# Altium footprint library Footprint.PcbLib: 411 footprints (part 5 of 26)
Each footprint in its own frame and in the unit in brackets; x right, y up, seen from the top. Pads: shape width x height; smd on the part's side, far side on the other; paste and mask are expansions set on the pad; w line width, h text height; cw(c..) or ccw(c..) is an arc to the next point about the centre after c.
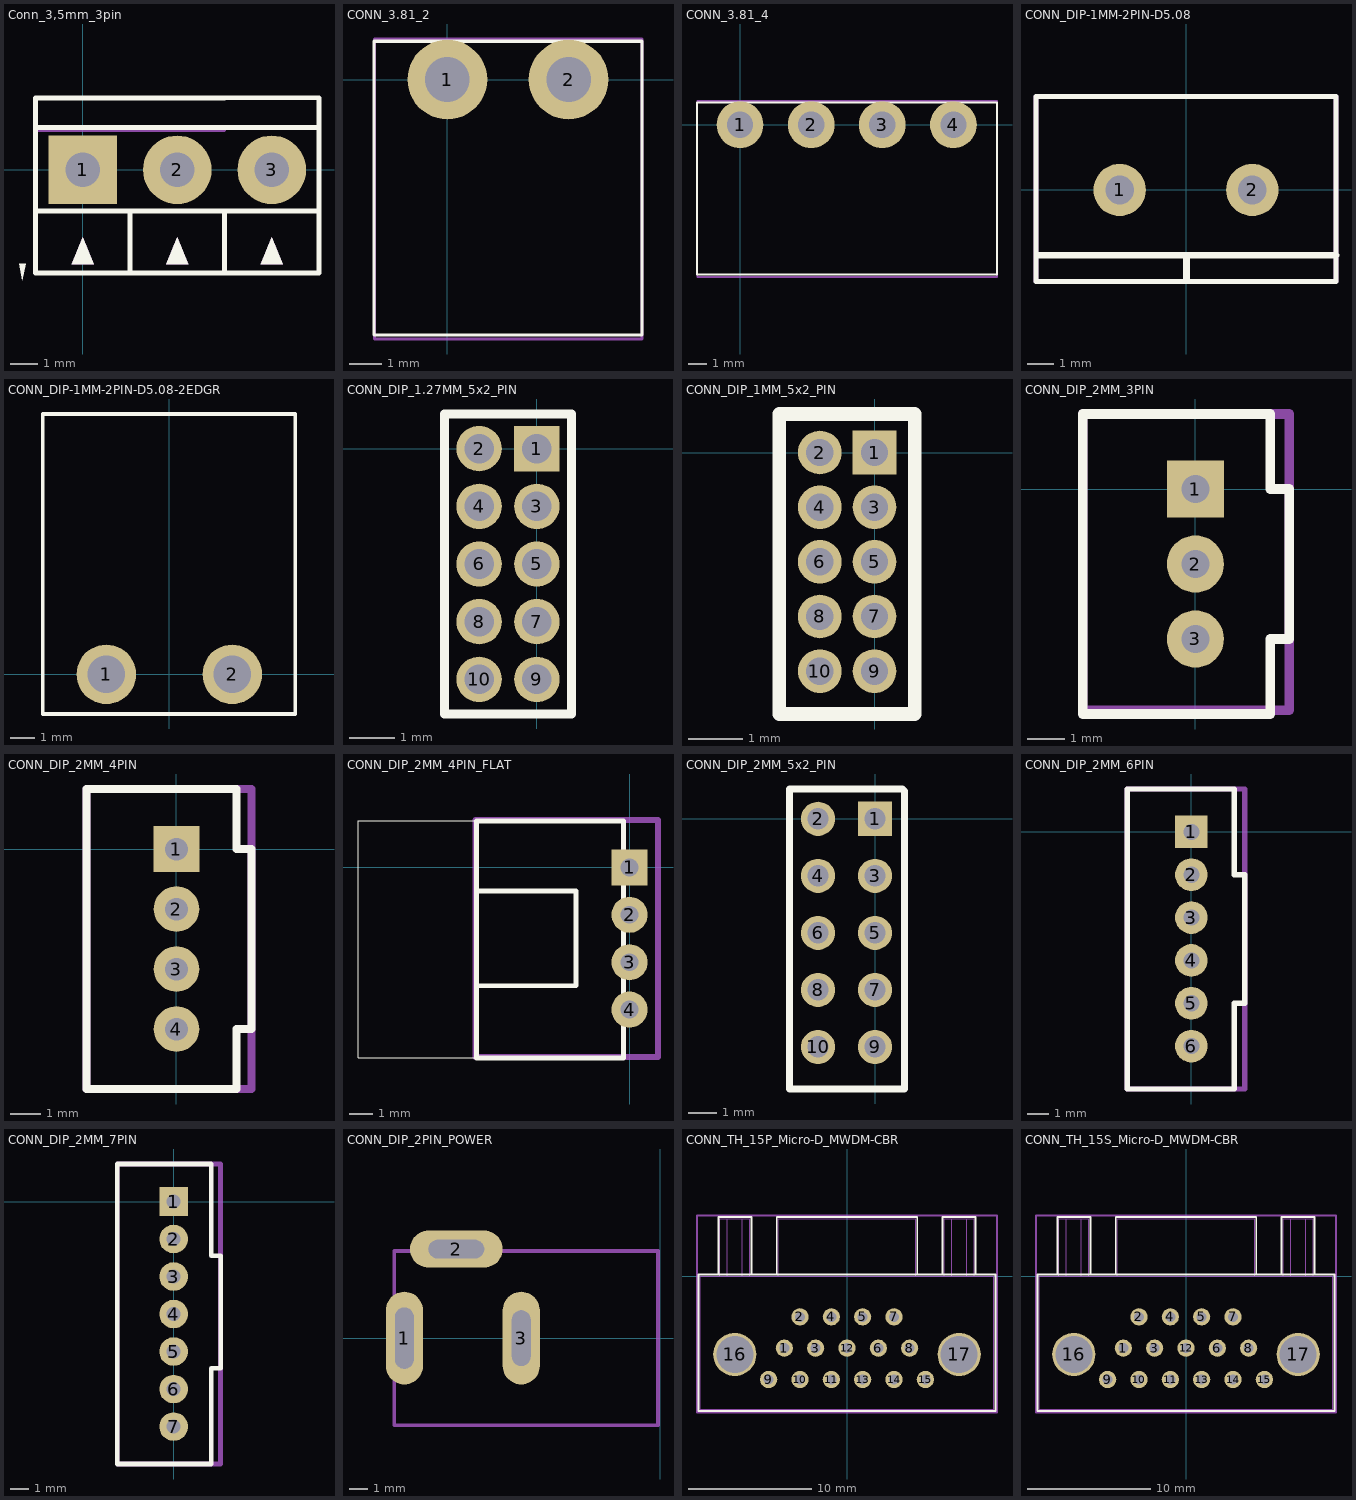
[diagram p4: the footprints below, top view; thin cyan lines are the x and y axes]

## Conn_3,5mm_3pin [mm]
pads (3):
  rect 2.54x2.54 hole 1.27: 1(0,0)
  round 2.54 hole 1.27: 2(3.5,0) 3(7,0)
Top Overlay:
  region: 7.4,-3.5 6.6,-3.5 7,-2.5
  region: 0.4,-3.5 -0.4,-3.5 0,-2.5
  region: 3.9,-3.5 3.1,-3.5 3.5,-2.5
  region: -2.235,-4.089 -2.108,-3.48 -2.362,-3.48
  lines w0.178: -1.752,1.572 1.748,1.572 8.748,1.572 8.748,2.672 1.748,2.672 -1.752,2.672 -1.752,1.472 -1.752,-1.528 ; 1.75,-3.815 1.75,-1.528 ; 1.75,-3.81 8.75,-3.81 ; 5.25,-3.815 5.25,-1.528 ; 5.25,-3.81 -1.75,-3.81 -1.75,2.667 5.25,2.667 ; 8.748,-3.828 5.248,-3.828 1.748,-3.828 -1.752,-3.828 -1.752,-1.528 ; 8.748,-1.528 5.248,-1.528 1.748,-1.528 -1.752,-1.528 ; 8.75,-3.815 8.75,-1.528 8.75,1.572
Assembly Bottom:
  region: 7.4,-3.5 6.6,-3.5 7,-2.5
  region: 0.4,-3.5 -0.4,-3.5 0,-2.5
  region: 3.9,-3.5 3.1,-3.5 3.5,-2.5
  lines w0.127: 1.75,-3.815 1.75,-1.528 ; 1.75,-3.81 8.75,-3.81 ; 5.248,1.472 1.748,1.472 -1.752,1.472 ; 5.248,2.672 1.748,2.672 -1.752,2.672 -1.752,1.472 ; 5.25,-3.815 5.25,-1.528 ; 5.25,-3.81 -1.75,-3.81 -1.75,2.667 5.25,2.667 ; 8.748,-3.828 5.248,-3.828 1.748,-3.828 -1.752,-3.828 -1.752,-1.528 ; 8.748,-1.528 5.248,-1.528 1.748,-1.528 -1.752,-1.528 ; 8.75,-3.815 8.75,-1.528 ; -1.752,-1.528 -1.752,1.472
  text ".Designator" at 0,3.1 h1.02

## CONN_3.81_2 [mm]
pads (2):
  round 2.5 hole 1.4: 1(0,0) 2(3.8,0)
Top Overlay:
  lines w0.1: -2.3,-8 6.1,-8 6.1,1.2 -2.3,1.2 -2.3,-8
Mechanical 15:
  lines w0.1: -2.286,-8.128 6.096,-8.128 6.096,1.27 -2.286,1.27 -2.286,-8.128
  text ".Designator" at -1.8,1.7 h1.52
3D body "User Library-ECH381R-02P.stp": height 7.2, standoff -3.4, extent -2.314,-7.902 6.096,1.298

## CONN_3.81_4 [mm]
pads (4):
  round 2.5 hole 1.4: 1(0,0) 2(3.8,0) 3(7.6,0) 4(11.4,0)
Top Overlay:
  lines w0.1: -2.3,-8 -2.3,1.2 13.73,1.2 13.73,-8 -2.3,-8
Mechanical 15:
  lines w0.1: -2.286,-8.128 -2.286,1.27 13.73,1.27 13.73,-8.128 -2.286,-8.128
  text ".Designator" at -1.8,1.7 h1.52
3D body "User Library-ECH381R-04P.stp": height 7.2, standoff -3.4, extent -2.295,-8.001 13.725,1.199

## CONN_DIP-1MM-2PIN-D5.08 [mm]
pads (2):
  round 2 hole 1.1: 1(-2.54,0) 2(2.54,0)
Top Overlay:
  lines w0.2: -5.74,-3.5 5.74,-3.5 5.74,3.575 -5.74,3.575 -5.74,-3.5
  lines w0.254: -5.7,-2.5 5.74,-2.5 ; 0.02,-3.4 0.02,-2.5
  text ".Designator" at -3.415,2.086 h1.52
Mechanical 15:
  lines w0.2: -5.74,-3.5 -5.74,3.575 5.74,3.575 5.74,-3.5 -5.74,-3.5
  text ".Designator" at -3.415,2.086 h1.52
3D body "38261.stp": height 15.1, standoff -3.4, extent -5.665,-4.8 5.065,4.7

## CONN_DIP-1MM-2PIN-D5.08-2EDGR [mm]
pads (2):
  round 2.4 hole 1.5: 1(-2.54,0) 2(2.54,0)
Top Overlay:
  lines w0.15: -5.1,-1.6 5.075,-1.6 5.075,10.5 -5.1,10.5 -5.1,-1.6
  text ".Designator" at -3.415,2.086 h1.52
Mechanical 15:
  text ".Designator" at -3.415,2.086 h1.52
3D body "User Library-2EDGR-5_08-02P.step": height 8.3, standoff -3.9, extent -5.09,-1.6 5.07,10.5

## CONN_DIP_1.27MM_5x2_PIN [mm]
pads (10):
  rect 1x1 hole 0.65: 1(0,0)
  round 1 hole 0.65: 2(-1.27,0) 3(0,-1.27) 4(-1.27,-1.27) 5(0,-2.54) 6(-1.27,-2.54) 7(0,-3.81) 8(-1.27,-3.81) 9(0,-5.08) 10(-1.27,-5.08)
Top Overlay:
  lines w0.2: -2.032,-5.842 -2.032,0.762 0.762,0.762 0.762,-5.842 -2.032,-5.842
Mechanical 15:
  text ".Designator" at -2.7,2.4 h1.52

## CONN_DIP_1MM_5x2_PIN [mm]
pads (10):
  rect 0.8x0.8 hole 0.5: 1(0,0)
  round 0.8 hole 0.5: 2(-1,0) 3(0,-1) 4(-1,-1) 5(0,-2) 6(-1,-2) 7(0,-3) 8(-1,-3) 9(0,-4) 10(-1,-4)
Top Overlay:
  lines w0.254: -1.744,-4.784 0.737,-4.784 0.737,0.705 -1.744,0.705 -1.744,-4.784
Mechanical 15:
  text ".Designator" at -2.7,2.4 h1.52

## CONN_DIP_2MM_3PIN [mil]
pads (3):
  rect 60x60 hole 29.53: 1(0,0)
  round 60 hole 29.53: 2(0,-78.74) 3(0,-157.48)
Top Overlay:
  lines w10: -118.11,-236.22 78.74,-236.22 78.74,-157.48 98.43,-157.48 98.43,0 78.74,0 78.74,78.74 -118.11,78.74 -118.11,-236.22
Mechanical 15:
  circle w10: c0,0 r11.81
  lines w10: -118.11,-232.28 98.43,-232.28 98.43,78.74 -118.11,78.74 -118.11,-232.28
  text ".Designator" at -118.11,94.49 h60

## CONN_DIP_2MM_4PIN [mil]
pads (4):
  rect 60x60 hole 29.53: 1(0,0)
  round 60 hole 29.53: 2(0,-78.74) 3(0,-157.48) 4(0,-236.22)
Top Overlay:
  lines w10: -118.11,-314.96 78.74,-314.96 78.74,-236.22 98.43,-236.22 98.43,0 78.74,0 78.74,78.74 -118.11,78.74 -118.11,-314.96
Mechanical 15:
  circle w10: c0,0 r8.8
  lines w10: -118.11,-314.96 -118.11,78.74 98.43,78.74 98.43,-314.96 -118.11,-314.96
  text ".Designator" at -98.43,98.43 h60

## CONN_DIP_2MM_4PIN_FLAT [mil]
pads (4):
  rect 60x60 hole 29.53: 1(0,0)
  round 60 hole 29.53: 2(0,-78.74) 3(0,-157.48) 4(0,-236.22)
Top Overlay:
  lines w1.97: -254.33,-316.54 -451.18,-316.54 -451.18,77.17 -254.33,77.17
  lines w7.87: -254.33,-196.46 -88.98,-196.46 -88.98,-38.98 -254.33,-38.98 ; -254.33,-316.54 -254.33,77.17 -10.24,77.17 -10.24,-316.54 -254.33,-316.54
Mechanical 15:
  circle w10: c0,0 r14.2
  lines w10: -255.91,-314.96 -255.91,78.74 47.24,78.74 47.24,-314.96 -255.91,-314.96
  text ".Designator" at -244.09,98.43 h60

## CONN_DIP_2MM_5x2_PIN [mm]
pads (10):
  rect 1.2x1.2 hole 0.75: 1(0,0)
  round 1.2 hole 0.75: 2(-2,0) 3(0,-2) 4(-2,-2) 5(0,-4) 6(-2,-4) 7(0,-6) 8(-2,-6) 9(0,-8) 10(-2,-8)
Top Overlay:
  lines w0.254: -3,-9.475 1.034,-9.475 1.034,-8 1.034,0.969 0.957,1.046 -3,1.046 -3,-9.475
Mechanical 15:
  text ".Designator" at -2.7,2.4 h1.52

## CONN_DIP_2MM_6PIN [mil]
pads (6):
  rect 60x60 hole 29.53: 1(0,0)
  round 60 hole 29.53: 2(0,-78.74) 3(0,-157.48) 4(0,-236.22) 5(0,-314.96) 6(0,-393.7)
Top Overlay:
  lines w10: -118.11,-472.44 78.74,-472.44 78.74,-314.96 98.43,-314.96 98.43,-78.74 78.74,-78.74 78.74,78.74 -118.11,78.74 -118.11,-472.44
Mechanical 15:
  circle w10: c0,0 r20.07
  lines w10: -118.11,-472.44 -118.11,78.74 98.43,78.74 98.43,-472.44 -118.11,-472.44
  text ".Designator" at -106.3,94.49 h60

## CONN_DIP_2MM_7PIN [mil]
pads (7):
  rect 60x60 hole 29.53: 1(0,0)
  round 60 hole 29.53: 2(0,-78.74) 3(0,-157.48) 4(0,-236.22) 5(0,-314.96) 6(0,-393.7) 7(0,-472.44)
Top Overlay:
  lines w10: 78.74,-350.22 78.74,-551 -118.11,-551 -118.11,78.74 78.74,78.74 78.74,-114 ; 79,-350.22 98.69,-350.22 98.69,-114 79,-114
Mechanical 15:
  circle w10: c0,0 r20.07
  lines w10: -118.11,-551 98.43,-551 98.43,78.74 -118.11,78.74 -118.11,-551
  text ".Designator" at -106.3,94.49 h60

## CONN_DIP_2PIN_POWER [mm]
pads (3):
  oval 2x5 hole 1 slot 3.3 at 90 deg: 1(-13.8,0)
  oval 5x2 hole 1 slot 3 at 0 deg: 2(-11,4.8)
  oval 2x5 hole 1 slot 3 at 90 deg: 3(-7.5,0)
Mechanical 13:
  lines w0.2: -14.351,-4.699 -0.127,-4.699 -0.127,4.699 -14.351,4.699 -14.351,-4.699
  text ".Designator" at -11.811,-4.064 h1.5
3D body "DJK-02A.step": height 11, standoff -3.78, extent -14.254,-4.65 -0.254,4.65

## CONN_TH_15P_Micro-D_MWDM-CBR [mil] "15 pin Glenair Micro-D MWDM-CBR Right Angle Thru-Hole"
height 309.84
pads (17):
  round 55 hole 32 mask+0: 1(-200,-230) 2(-150,-130) 3(-100,-230) 4(-50,-130) 5(50,-130) 6(100,-230) 7(150,-130) 8(200,-230) 9(-250,-330) 10(-150,-330) 11(-50,-330) 12(0,-230) 13(50,-330) 14(150,-330) 15(250,-330)
  round 137.8 hole 118.11 unplated: 16(-357.87,-250.08) 17(357.87,-250.08)
Top Overlay:
  lines w6: -473.5,-430 -473.5,5 473.5,5 473.5,-430 -472.44,-430 ; -410.5,7.87 -410.5,188 -304.5,188 -304.5,5 ; -224,7.87 -224,188 224,188 224,7.87 ; 304.5,5 304.5,188 410.5,188 410.5,5
Mechanical 13:
  lines w1: -405.5,0 -405.5,183 -309.5,183 -309.5,0 ; -381.5,0 -381.5,183 ; -333.5,0 -333.5,183 ; 309.5,0 309.5,183 405.5,183 405.5,0 ; 333.5,0 333.5,183 ; 381.5,0 381.5,183 ; -468.5,-425 468.5,-425 468.5,0 -468.5,0 -468.5,-425 ; -219,0 219,0 219,183 -219,183 -219,0
Mechanical 15:
  lines w6: -478.5,-435 -478.5,193 478.5,193 478.5,-435 -478.5,-435
3D body "mwdmxl-15pcbr.stp": height 312.4, standoff -106.5, extent -467.52,-420.08 467.52,186.22

## CONN_TH_15S_Micro-D_MWDM-CBR [mil] "15 pin Glenair Micro-D MWDM-CBR Right Angle Thru-Hole"
height 309.84
pads (17):
  round 55 hole 32 mask+0: 1(-200,-230) 2(-150,-130) 3(-100,-230) 4(-50,-130) 5(50,-130) 6(100,-230) 7(150,-130) 8(200,-230) 9(-250,-330) 10(-150,-330) 11(-50,-330) 12(0,-230) 13(50,-330) 14(150,-330) 15(250,-330)
  round 137.8 hole 118.11 unplated: 16(-357.87,-250.08) 17(357.87,-250.08)
Top Overlay:
  lines w6: -473.5,-430 -473.5,5 473.5,5 473.5,-430 -472.44,-430 ; -410.5,7.87 -410.5,188 -304.5,188 -304.5,5 ; -224,7.87 -224,188 224,188 224,7.87 ; 304.5,5 304.5,188 410.5,188 410.5,5
Mechanical 13:
  lines w1: -405.5,0 -405.5,183 -309.5,183 -309.5,0 ; -381.5,0 -381.5,183 ; -333.5,0 -333.5,183 ; 309.5,0 309.5,183 405.5,183 405.5,0 ; 333.5,0 333.5,183 ; 381.5,0 381.5,183 ; -468.5,-425 468.5,-425 468.5,0 -468.5,0 -468.5,-425 ; -219,0 219,0 219,183 -219,183 -219,0
Mechanical 15:
  lines w6: -478.5,-435 -478.5,193 478.5,193 478.5,-435 -478.5,-435
3D body "mwdmxl-15scbr.stp": height 312.4, standoff -101.77, extent -467.52,-420.08 467.52,198.04